# Altium integrated library ERJP08J104V.IntLib: 1 symbol
Pins are listed as number, name and electrical type; pins without a type are passive.

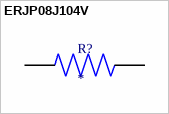
[diagram p0: symbol ERJP08J104V]

## ERJP08J104V
designator R?
100 kOhms Â±5% 0.667W, 2/3W Chip Resistor 1206 (3216 Metric) Automotive AEC-Q200, Pulse Withstanding Thick Film; MF: Panasonic; MP: ERJP08J104V; SnapEDA_Link: https://www.snapeda.com/parts/ERJP08J104V/Panasonic/view-part/?ref=snap; Package: 3216-2 Panasonic; Value: *; Digi-Key_Part_Number: P100KALTR-ND; Check_prices: https://www.snapeda.com/parts/ERJP08J104V/Panasonic/view-part/?ref=eda
footprint RES_ERJP08J104V
pins: 1, 2